# Altium footprint library G4R_NANO.PcbLib: 1 footprints
Each footprint in its own frame and in the unit in brackets; x right, y up, seen from the top. Pads: shape width x height; smd on the part's side, far side on the other; paste and mask are expansions set on the pad; w line width, h text height; cw(c..) or ccw(c..) is an arc to the next point about the centre after c.
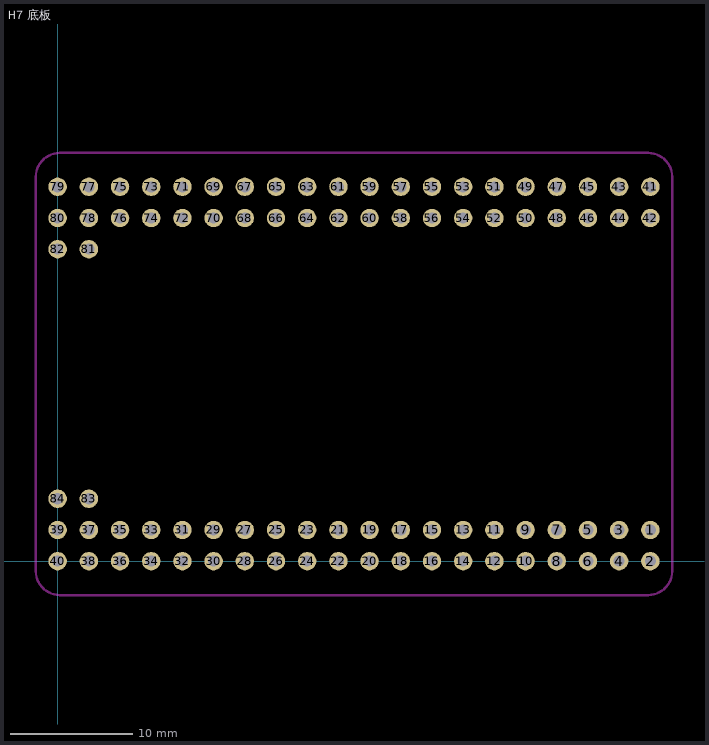
[diagram p0: the footprint, top view; thin cyan lines are the x and y axes]

## H7 底板 [mm]
pads (84):
  round 1.5 hole 0.9: 1(48.26,2.54) 2(48.26,0) 3(45.72,2.54) 4(45.72,0) 5(43.18,2.54) 6(43.18,0) 7(40.64,2.54) 8(40.64,0) 9(38.1,2.54) 10(38.1,0) 11(35.56,2.54) 12(35.56,0) 13(33.02,2.54) 14(33.02,0) 15(30.48,2.54) 16(30.48,0) 17(27.94,2.54) 18(27.94,0) 19(25.4,2.54) 20(25.4,0) 21(22.86,2.54) 22(22.86,0) 23(20.32,2.54) 24(20.32,0) 25(17.78,2.54) 26(17.78,0) 27(15.24,2.54) 28(15.24,0) 29(12.7,2.54) 30(12.7,0) 31(10.16,2.54) 32(10.16,0) 33(7.62,2.54) 34(7.62,0) 35(5.08,2.54) 36(5.08,0) 37(2.54,2.54) 38(2.54,0) 39(0,2.54) 40(0,0) 41(48.26,30.48) 42(48.26,27.94) 43(45.72,30.48) 44(45.72,27.94) 45(43.18,30.48) 46(43.18,27.94) 47(40.64,30.48) 48(40.64,27.94) 49(38.1,30.48) 50(38.1,27.94) 51(35.56,30.48) 52(35.56,27.94) 53(33.02,30.48) 54(33.02,27.94) 55(30.48,30.48) 56(30.48,27.94) 57(27.94,30.48) 58(27.94,27.94) 59(25.4,30.48) 60(25.4,27.94) 61(22.86,30.48) 62(22.86,27.94) 63(20.32,30.48) 64(20.32,27.94) 65(17.78,30.48) 66(17.78,27.94) 67(15.24,30.48) 68(15.24,27.94) 69(12.7,30.48) 70(12.7,27.94) 71(10.16,30.48) 72(10.16,27.94) 73(7.62,30.48) 74(7.62,27.94) 75(5.08,30.48) 76(5.08,27.94) 77(2.54,30.48) 78(2.54,27.94) 79(0,30.48) 80(0,27.94) 81(2.54,25.4) 82(0,25.4) 83(2.54,5.08) 84(0,5.08)
Keep-Out Layer:
  lines w0.2: -1.778,-0.815 ccw(c0.167,-0.815) 0.167,-2.76 48.093,-2.76 ccw(c48.093,-0.815) 50.038,-0.815 50.038,31.294 ccw(c48.093,31.294) 48.093,33.239 0.167,33.24 ccw(c0.167,31.294) -1.778,31.294 -1.778,-0.815